# Altium schematic symbol library CDSOD323-T12C.SchLib: 1 symbol
Pins are listed as number, name and electrical type; pins without a type are passive.

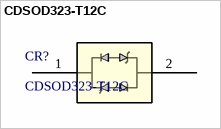
[diagram p0: symbol CDSOD323-T12C]

## CDSOD323-T12C
designator CR?
No Description Available; Manufacturer_Name: Bourns Electronics; Copyright: Copyright (C) 2026 Ultra Librarian. All rights reserved.; Manufacturer_Part_Number: CDSOD323-T12C; RefDes: RefDes; Type: Type
footprint CDSOD_BIDI_BRN
pins: 1, 2